# Altium footprint library CKey_Pcb.PcbLib: 41 footprints (part 2 of 3)
Each footprint in its own frame and in the unit in brackets; x right, y up, seen from the top. Pads: shape width x height; smd on the part's side, far side on the other; paste and mask are expansions set on the pad; w line width, h text height; cw(c..) or ccw(c..) is an arc to the next point about the centre after c.
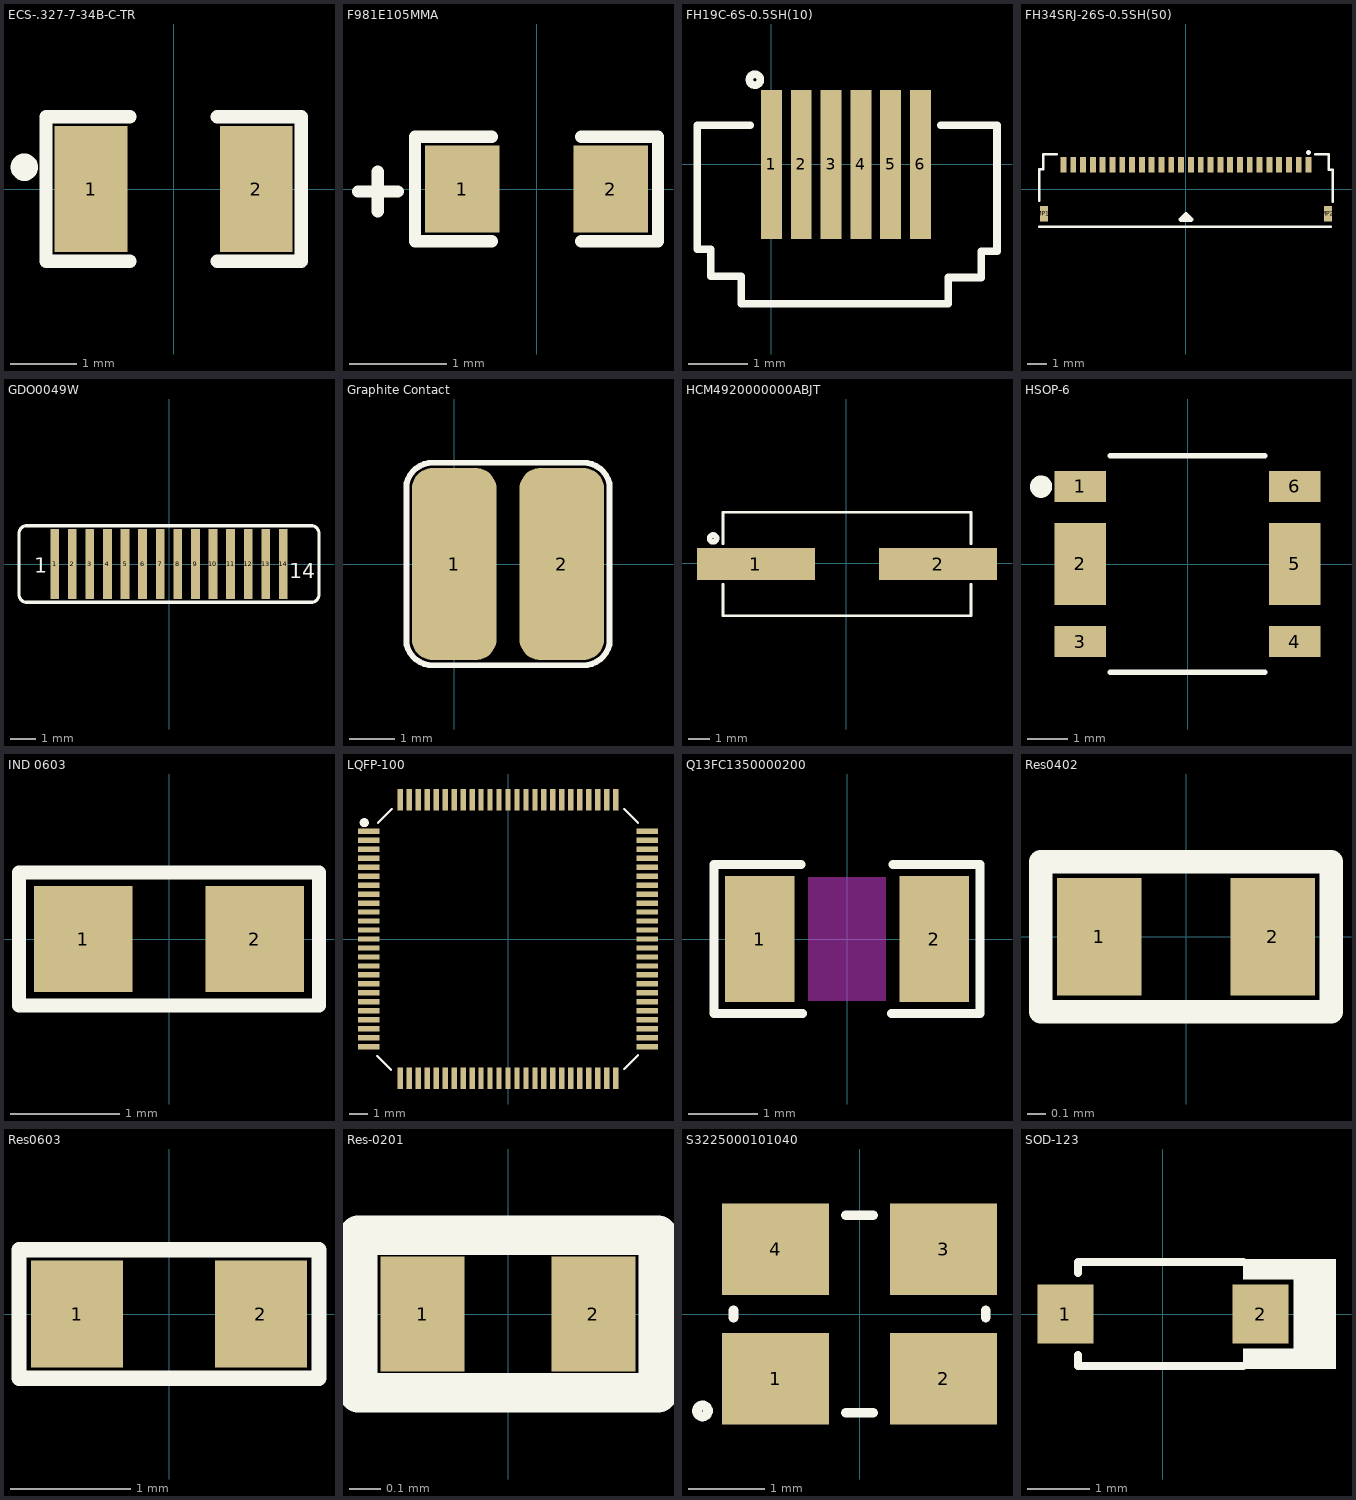
[diagram p1: the footprints below, top view; thin cyan lines are the x and y axes]

## ECS-.327-7-34B-C-TR [mm] "CRYSTAL 32.7680KHZ 12.5PF SMD"
pads (2):
  rect 1.1x1.9 smd: 1(-1.25,0) 2(1.25,0)
Top Overlay:
  circle w0.254: c-2.261,0.33 r0.08
  lines w0.2: -0.66,-1.092 -1.93,-1.092 -1.93,1.092 -0.66,1.092 ; 0.66,-1.092 1.93,-1.092 1.93,1.092 0.66,1.092
3D body "ECS-.327-12.5-34B-C-TR--3DModel-STEP-40055.STEP": height 0.87, standoff -0.03, extent -1.6,-0.775 1.6,0.725

## F981E105MMA [mil]
pads (2):
  rect 30x35 smd mask+2.36: 1(-30,0) 2(30,0)
Top Overlay:
  lines w5: -72,-1 -56,-1 ; -64,-9 -64,7 ; -18,-21 -49,-21 -49,21 -18,21 ; 18,-21 49,-21 49,21 18,21
3D body "F981E105MMA.STEP": height 35.43, standoff 0, extent -31.5,-16.73 31.5,16.73

## FH19C-6S-0.5SH(10) [mm] "Clamshell 0.5mm Bottom Contact Surface Mount 6 SMD,P=0.5mm FFC/FPC Connectors ROHS"
pads (6):
  rect 0.35x2.5 smd: 1(0,0) 2(0.5,0) 3(1,0) 4(1.5,0) 5(2,0) 6(2.5,0)
Top Overlay:
  circle w0.127: c-0.279,1.422 r0.092
  lines w0.127: -0.356,0.66 -1.245,0.66 -1.245,-1.423 -1.019,-1.423 -1.019,-1.879 -0.508,-1.879 -0.508,-2.337 2.966,-2.337 2.966,-1.897 3.523,-1.897 3.523,-1.454 3.785,-1.454 3.785,0.66 2.845,0.66
3D body "FH19C-6S-0.5SH.stp": height 0.9, standoff 0, extent -1.241,-2.385 3.759,1.115

## FH34SRJ-26S-0.5SH(50) [mm] "CONN FFC FPC 26POS 0.50MM R/A"
pads (28):
  rect 0.3x0.8 smd: 1(6.25,1.25) 2(5.75,1.25) 3(5.25,1.25) 4(4.75,1.25) 5(4.25,1.25) 6(3.75,1.25) 7(3.25,1.25) 8(2.75,1.25) 9(2.25,1.25) 10(1.75,1.25) 11(1.25,1.25) 12(0.75,1.25) 13(0.25,1.25) 14(-0.25,1.25) 15(-0.75,1.25) 16(-1.25,1.25) 17(-1.75,1.25) 18(-2.25,1.25) 19(-2.75,1.25) 20(-3.25,1.25) 21(-3.75,1.25) 22(-4.25,1.25) 23(-4.75,1.25) 24(-5.25,1.25) 25(-5.75,1.25) 26(-6.25,1.25)
  rect 0.4x0.8 smd: MP1(-7.25,-1.25) MP2(7.25,-1.25)
Top Overlay:
  circle w0.127: c6.248,1.88 r0.057
  lines w0.127: -7.493,-1.905 7.391,-1.905 ; -7.493,-0.584 -7.493,1.016 -7.29,1.016 -7.29,1.786 -6.604,1.786 ; 6.604,1.778 7.29,1.778 7.29,1.008 7.493,1.008 7.493,-0.635
  lines w0.254: -0.254,-1.549 0.254,-1.549 0,-1.295 -0.254,-1.549
3D body "FH34SRJ-26S-0.5SH.stp": height 1, standoff 0, extent -7.5,-1.9 7.5,1.9

## GDO0049W [mm]
pads (14):
  rect 0.35x2.8 smd: 1(-4.55,0) 2(-3.85,0) 3(-3.15,0) 4(-2.45,0) 5(-1.75,0) 6(-1.05,0) 7(-0.35,0) 8(0.35,0) 9(1.05,0) 10(1.75,0) 11(2.45,0) 12(3.15,0) 13(3.85,0) 14(4.55,0)
Top Overlay:
  lines w0.127: -5.969,-1.219 ccw(c-5.664,-1.219) -5.664,-1.524 0,-1.524 5.664,-1.524 ccw(c5.664,-1.219) 5.969,-1.219 5.969,1.219 ccw(c5.664,1.219) 5.664,1.524 0,1.524 -5.664,1.524 ccw(c-5.664,1.219) -5.969,1.219 -5.969,-1.219
  text "1" at -5.359,-0.356 h0.6
  text "14" at 4.775,-0.559 h0.6

## Graphite Contact [mm]
pads (2):
  rrect50% 1.85x4.2 smd: 1(0,0) 2(2.35,0)
Top Overlay:
  lines w0.127: 2.807,-2.21 ccw(c2.826,-1.633) 3.391,-1.753 3.391,1.753 ccw(c2.826,1.633) 2.807,2.21 ; 2.819,-2.21 -0.457,-2.21 cw(c-0.476,-1.633) -1.041,-1.753 -1.041,1.753 cw(c-0.476,1.633) -0.457,2.21 2.819,2.21

## HCM4920000000ABJT [mm] "CRYSTAL 20.0000MHZ 18PF SMD"
pads (2):
  rect 5.5x1.5 smd: 1(-4.225,-0.025) 2(4.275,-0.025)
Top Overlay:
  circle w0.254: c-6.223,1.168 r0.163
  lines w0.127: -5.765,-0.965 -5.765,-2.441 5.814,-2.441 ; -5.765,0.914 -5.765,2.39 5.814,2.39 ; 5.816,-2.441 5.816,-0.965 ; 5.816,0.914 5.816,2.39
3D body "User Library-Crystal HC49_US-SM.STEP": height 4.3, standoff 0, extent -6.374,-2.44 6.426,2.39

## HSOP-6 [mm] "1A 60dB@(1kHz) 100mV@(300mA) Fixed 3.3V~3.3V Positive 1 5.5V HSOP-6"
pads (6):
  rect 1.27x0.76 smd: 1(-2.64,1.91) 3(-2.64,-1.91) 4(2.64,-1.91) 6(2.64,1.91)
  rect 1.27x2.03 smd: 2(-2.64,0) 5(2.64,0)
Top Overlay:
  circle w0.3: c-3.607,1.905 r0.125
  lines w0.127: -1.905,-2.667 1.905,-2.667 ; -1.905,2.667 1.905,2.667
3D body "User Library-HSOP-6.STEP": height 1.6, standoff -0.15, extent -3.136,-2.65 3.136,2.65

## IND 0603 [mm]
pads (2):
  rect 0.9x0.97 smd: 1(-0.785,0) 2(0.785,0)
Top Overlay:
  lines w0.127: -1.372,-0.61 1.372,-0.61 1.372,0.61 -1.372,0.61 -1.372,-0.61
3D body "45630.stp": height 0.76, standoff -0.04, extent -0.8,-0.4 0.8,0.4

## LQFP-100 [mm]
pads (100):
  rect 1.2x0.3 smd: 1(-7.75,6) 2(-7.75,5.5) 3(-7.75,5) 4(-7.75,4.5) 5(-7.75,4) 6(-7.75,3.5) 7(-7.75,3) 8(-7.75,2.5) 9(-7.75,2) 10(-7.75,1.5) 11(-7.75,1) 12(-7.75,0.5) 13(-7.75,0) 14(-7.75,-0.5) 15(-7.75,-1) 16(-7.75,-1.5) 17(-7.75,-2) 18(-7.75,-2.5) 19(-7.75,-3) 20(-7.75,-3.5) 21(-7.75,-4) 22(-7.75,-4.5) 23(-7.75,-5) 24(-7.75,-5.5) 25(-7.75,-6) 51(7.75,-6) 52(7.75,-5.5) 53(7.75,-5) 54(7.75,-4.5) 55(7.75,-4) 56(7.75,-3.5) 57(7.75,-3) 58(7.75,-2.5) 59(7.75,-2) 60(7.75,-1.5) 61(7.75,-1) 62(7.75,-0.5) 63(7.75,0) 64(7.75,0.5) 65(7.75,1) 66(7.75,1.5) 67(7.75,2) 68(7.75,2.5) 69(7.75,3) 70(7.75,3.5) 71(7.75,4) 72(7.75,4.5) 73(7.75,5) 74(7.75,5.5) 75(7.75,6)
  rect 0.3x1.2 smd: 26(-6,-7.75) 27(-5.5,-7.75) 28(-5,-7.75) 29(-4.5,-7.75) 30(-4,-7.75) 31(-3.5,-7.75) 32(-3,-7.75) 33(-2.5,-7.75) 34(-2,-7.75) 35(-1.5,-7.75) 36(-1,-7.75) 37(-0.5,-7.75) 38(0,-7.75) 39(0.5,-7.75) 40(1,-7.75) 41(1.5,-7.75) 42(2,-7.75) 43(2.5,-7.75) 44(3,-7.75) 45(3.5,-7.75) 46(4,-7.75) 47(4.5,-7.75) 48(5,-7.75) 49(5.5,-7.75) 50(6,-7.75) 76(6,7.75) 77(5.5,7.75) 78(5,7.75) 79(4.5,7.75) 80(4,7.75) 81(3.5,7.75) 82(3,7.75) 83(2.5,7.75) 84(2,7.75) 85(1.5,7.75) 86(1,7.75) 87(0.5,7.75) 88(0,7.75) 89(-0.5,7.75) 90(-1,7.75) 91(-1.5,7.75) 92(-2,7.75) 93(-2.5,7.75) 94(-3,7.75) 95(-3.5,7.75) 96(-4,7.75) 97(-4.5,7.75) 98(-5,7.75) 99(-5.5,7.75) 100(-6,7.75)
Top Overlay:
  circle w0.254: c-8.001,6.477 r0.127
  lines w0.127: -7.273,-6.511 -6.511,-7.273 ; -7.239,6.477 -6.477,7.239 ; 6.477,-7.239 7.239,-6.477 ; 6.477,7.239 7.239,6.477
3D body "User Library-LQFP100_05.step": height 1.6, standoff 0, extent -8,-8 8,8

## Q13FC1350000200 [mm] "CRYSTAL 32.7680KHZ 7PF SMD"
pads (2):
  rect 1x1.8 smd: 1(-1.25,0) 2(1.25,0)
Top Overlay:
  lines w0.127: -0.66,1.067 -1.905,1.067 -1.905,-1.067 -0.635,-1.067 ; 0.635,-1.067 1.905,-1.067 1.905,1.067 0.66,1.067
Keep-Out Layer:
  rectangle: -0.559,-0.889 0.559,0.889
3D body "ECS-.327-12.5-34B-C-TR--3DModel-STEP-40055.STEP": height 0.87, standoff -0.03, extent -1.6,-0.775 1.6,0.725

## Res0402 [mil]
pads (2):
  rect 18x25 smd mask+4: 1(-18.5,0) 2(18.5,0)
Top Overlay:
  lines w0.13: -32,-17 32,-17
  lines w5: -31,-16 -31,16 31,16 31,-16 -31,-16
3D body "User Library-RES_1005-0402.step": height 16.14, standoff 0, extent -22.63,-10.82 22.64,10.83

## Res0603 [mil]
pads (2):
  rect 30x35 smd: 1(-30,0) 2(30,0)
Top Overlay:
  lines w5: -49,-21 49,-21 49,21 -49,21 -49,-21
3D body "User Library-RESC1608X05N.step": height 17.76, standoff 0, extent -30.52,-16.74 30.51,16.73

## Res-0201 [mm]
pads (2):
  rect 0.27x0.37 smd: 1(-0.275,0) 2(0.275,0)
Top Overlay:
  lines w0.127: -0.483,-0.254 0.483,-0.254 0.483,0.254 -0.483,0.254 -0.483,-0.254
3D body "User Library-0201(0603M) Res.step": height 0.29, standoff -0.02, extent -0.305,-0.152 0.305,0.153

## S3225000101040 [mm] "25MHz SMD Crystal Resonator 10pF 40O ±10ppm"
pads (4):
  rect 1.4x1.2 smd: 1(-1.1,-0.85) 2(1.1,-0.85) 3(1.1,0.85) 4(-1.1,0.85)
Top Overlay:
  circle w0.127: c-2.057,-1.27 r0.072
  lines w0.127: -1.651,-0.051 -1.651,0.051 ; -0.178,-1.295 0.178,-1.295 ; -0.178,1.295 0.178,1.295 ; 1.651,-0.051 1.651,0.051
3D body "User Library-Crystal_ECX-32.STEP": height 0.82, standoff 0, extent -1.6,-1.25 1.6,1.25

## SOD-123 [mm]
pads (2):
  rect 0.9x0.95 smd: 1(-1.575,0) 2(1.575,0)
Top Overlay:
  region: 2.794,0.889 2.111,0.889 2.111,-0.889 2.794,-0.889
  rectangle: 1.295,0.559 2.21,0.889
  rectangle: 1.295,-0.889 2.21,-0.559
  lines w0.127: -1.372,-0.66 -1.372,-0.838 1.295,-0.838 ; -1.372,0.66 -1.372,0.838 1.295,0.838
3D body "CircuitWorks-SOD123.step": height 1.27, standoff 0, extent -1.85,-0.8 1.85,0.8